# Altium footprint library 22272051.PcbLib: 1 footprints
Each footprint in its own frame and in the unit in brackets; x right, y up, seen from the top. Pads: shape width x height; smd on the part's side, far side on the other; paste and mask are expansions set on the pad; w line width, h text height; cw(c..) or ccw(c..) is an arc to the next point about the centre after c.
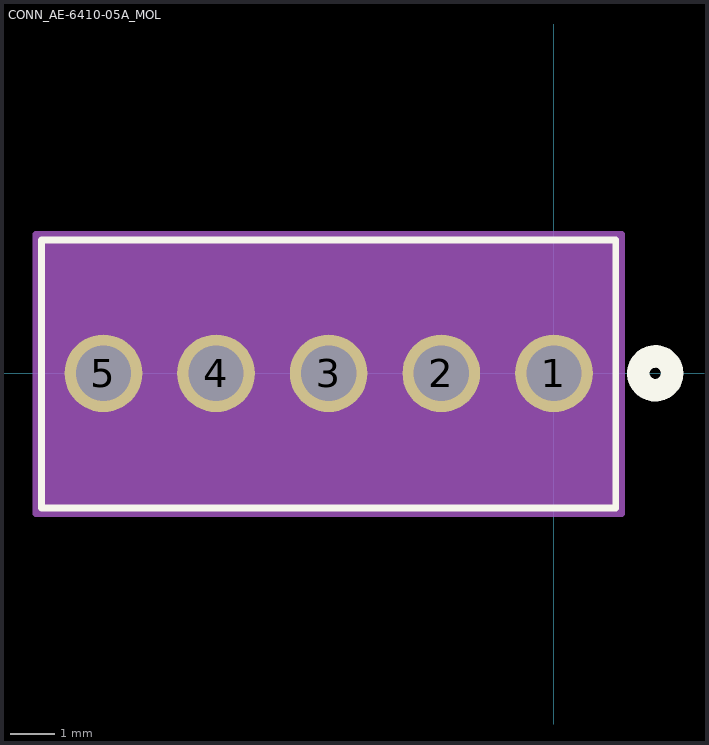
[diagram p0: the footprint, top view; thin cyan lines are the x and y axes]

## CONN_AE-6410-05A_MOL [mil]
pads (5):
  round 69 / inner round 60 / far side round 69 hole 49 paste-99999 mask+0: 1(0,0) 2(-100,0) 3(-200,0) 4(-300,0) 5(-400,0)
Top Overlay:
  circle w20: c90,0 r15
  lines w6: -455,-119.61 55,-119.61 55,118.39 -455,118.39 -455,-119.61
Bottom Overlay:
  circle w20: c90,0 r15
Mechanical 13:
  circle w20: c0,0 r15
  lines w1: -450,-114.61 50,-114.61 50,113.39 -450,113.39 -450,-114.61
Mechanical 15:
  region: 60,123.39 -460,123.39 -460,-124.61 60,-124.61
  lines w6: -460,-124.61 -460,123.39 60,123.39 60,-124.61 -460,-124.61
3D body "022272051.stp": height 463.43, standoff -137.36, extent -450,-103.35 50,125